# Altium schematic symbol library ZMM2V2.SchLib: 1 symbol
Pins are listed as number, name and electrical type; pins without a type are passive.

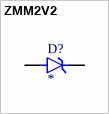
[diagram p0: symbol ZMM2V2]

## ZMM2V2
designator D?
2.2V 500mW Silicon Epitaxial Planar Zener Diodes SMD MiniMELF (LL34); MF: Kingtronics; MP: ZMM2V2; SnapEDA_Link: https://www.snapeda.com/parts/ZMM2V2/Kingtronics/view-part/?ref=snap; Package: None; Value: *; Check_prices: https://www.snapeda.com/parts/ZMM2V2/Kingtronics/view-part/?ref=eda
footprint DIOMELF3514N
pins: 1 K, 2 A